# EAGLE library part G125-MH11605M4P (library G125-MH11605M4P)
Gecko-SL: 8+8 Pos Plug DIL Right-Angle 3.2mm THT Connector Screw-Lok Board Mount Source: Datasheet <https://content.harwin.com/m/667f1be9427fb768/original/DRG-02921-Technical-Drawing-Datasheet-G125-MH1XX05M4P-pdf.pdf>
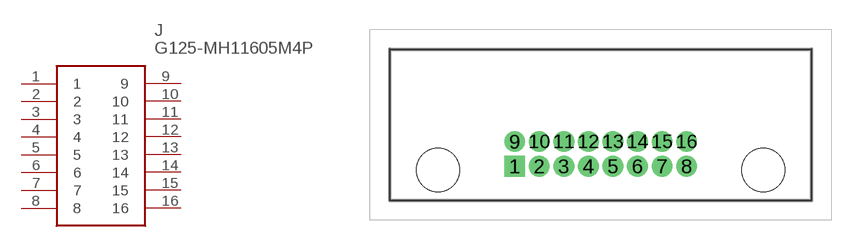
[diagram p0: symbol with the pads of G125-MH11605M4P_1; footprint G125-MH11605M4P_1]

Designator prefix J

## G125-MH11605M4P (Description: Gecko-SL: 8+8 Pos Plug DIL Right-Angle 3.2mm THT Connector Screw-Lok Board Mount; Height: 5.3mm; Manufacturer_Name: Harwin; Manufacturer_Part_Number: G125-MH11605M4P; Mouser_Part_Number: 855-G125MH1165M4PM4P; Mouser_Price-Stock: https://www.mouser.co.uk/ProductDetail/Harwin/G125-MH11605M4P?qs=vHuUswq2%252BszmOoz18%252BqG2Q%3D%3D)  [G125-MH11605M4P_1]
1  1
2  2
3  3
4  4
5  5
6  6
7  7
8  8
9  9
10  10
11  11
12  12
13  13
14  14
15  15
16  16

## Footprint G125-MH11605M4P_1 (pad centres in mm)
G125-MH11605M4P_1
drill 0.55 pad 0.95 square: 1 0,0
drill 0.55 pad 0.95: 2 1.25,0; 3 2.5,0; 4 3.75,0; 5 5,0; 6 6.25,0; 7 7.5,0; 8 8.75,0; 9 0,1.25; 10 1.25,1.25; 11 2.5,1.25; 12 3.75,1.25; 13 5,1.25; 14 6.25,1.25; 15 7.5,1.25; 16 8.75,1.25
hole 2.2 at -3.9,-0.2
hole 2.2 at 12.65,-0.2